# Altium footprint library clusterhead.PcbLib: 75 footprints (part 1 of 5)
Each footprint in its own frame and in the unit in brackets; x right, y up, seen from the top. Pads: shape width x height; smd on the part's side, far side on the other; paste and mask are expansions set on the pad; w line width, h text height; cw(c..) or ccw(c..) is an arc to the next point about the centre after c.
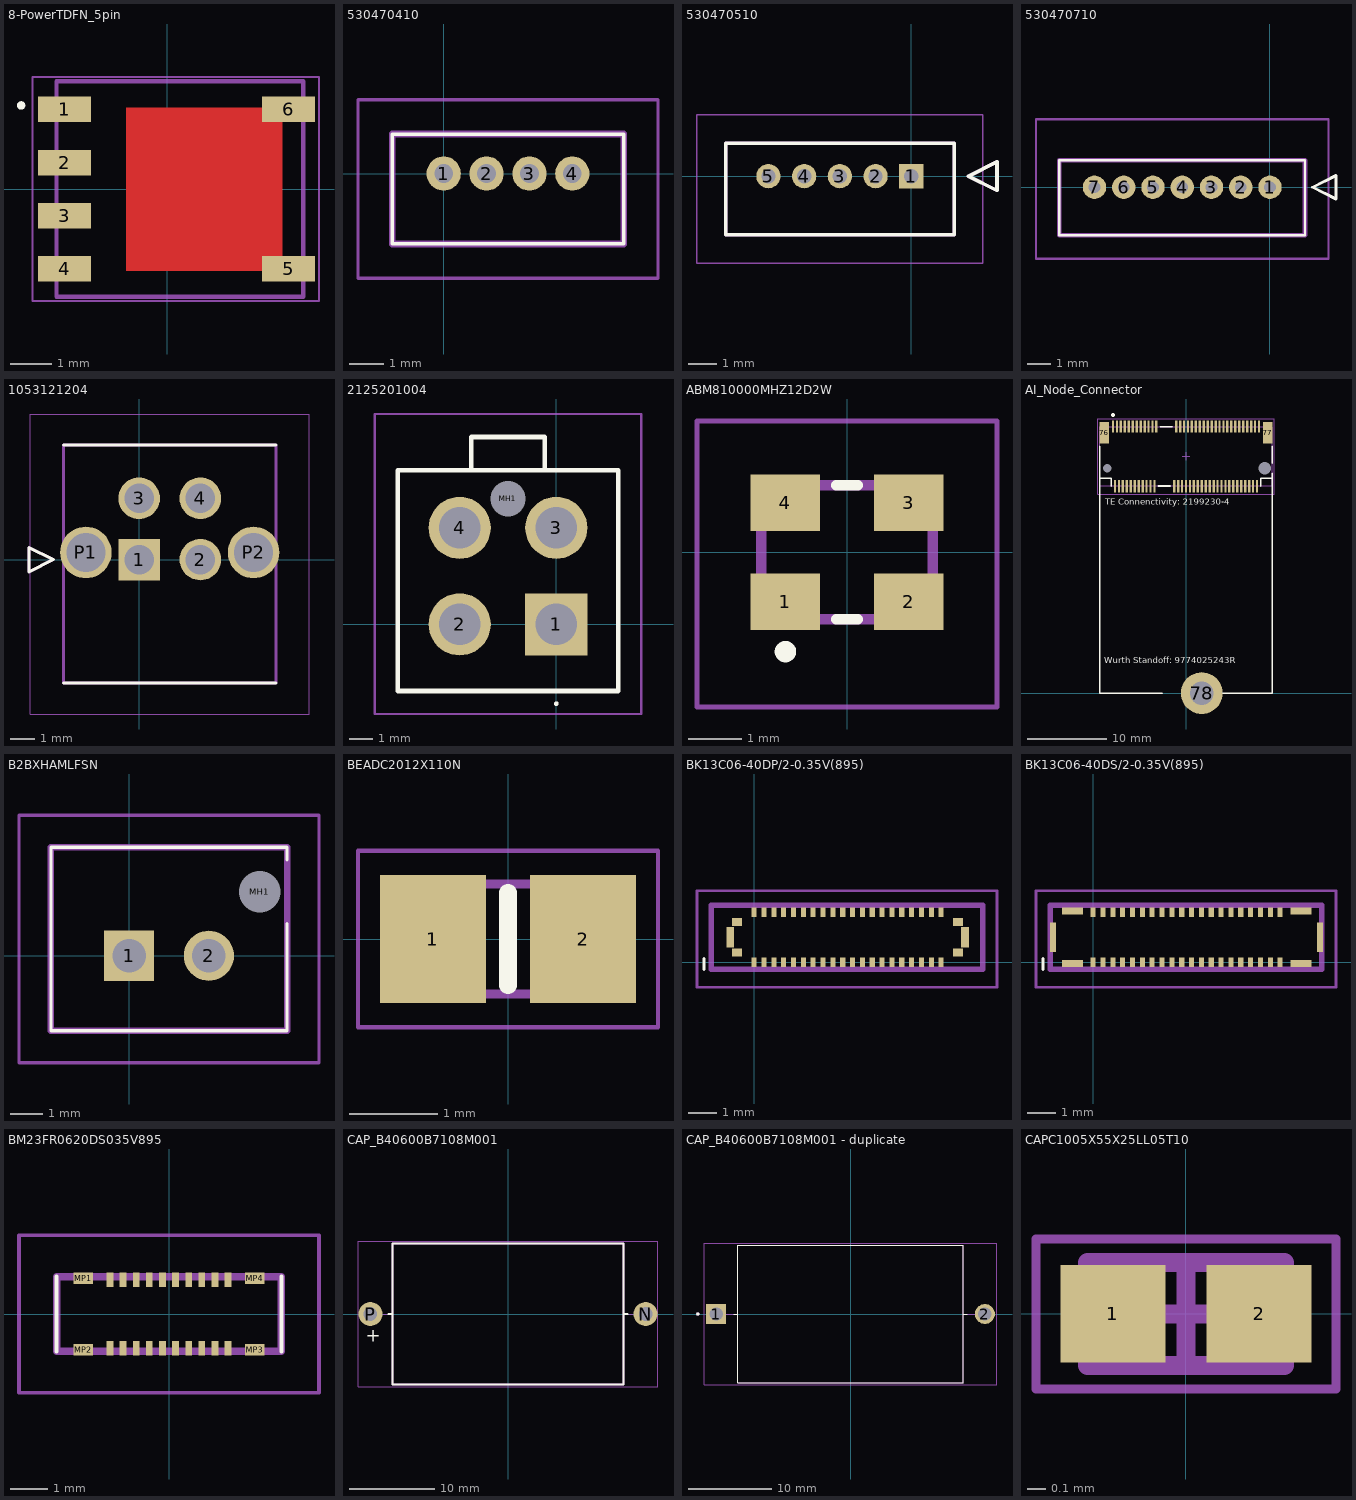
[diagram p0: the footprints below, top view; thin cyan lines are the x and y axes]

## 8-PowerTDFN_5pin [mm] "8-PowerTDFN"
pads (6):
  rect 1.27x0.61 smd: 1(-2.46,1.905) 2(-2.46,0.635) 3(-2.46,-0.635) 4(-2.46,-1.905) 5(2.897,-1.905) 6(2.897,1.905)
Top Layer:
  region: -0.995,1.955 -0.995,-1.955 2.755,-1.955 2.755,1.955
Top Overlay:
  circle w0.1: c-3.5,2 r0.05
Top Paste:
  region: -0.995,1.955 -0.995,-1.955 2.755,-1.955 2.755,1.955
Mechanical 13:
  lines w0.1: -2.653,-2.573 -2.653,2.577 3.247,2.577 3.247,-2.573 -2.653,-2.573
Mechanical 15:
  lines w0.05: -3.228,-2.673 -3.228,2.677 3.622,2.677 3.622,-2.673 -3.228,-2.673
  lines w0.1: -0.503,0.002 0.497,0.002 ; -0.003,-0.498 -0.003,0.502
3D body "IRFH8202TRPBF.STEP": height 1.17, standoff 0, extent -2.737,-2.512 3.338,2.513

## 530470410 [mm]
pads (4):
  round 1 hole 0.55: 1(0,0) 2(1.25,0) 3(2.5,0) 4(3.75,0)
Top Overlay:
  lines w0.1: -1.5,-2.05 5.25,-2.05 5.25,1.15 -1.5,1.15 -1.5,-2.05
Mechanical 13:
  lines w0.2: -1.5,-2.05 5.25,-2.05 5.25,1.15 -1.5,1.15 -1.5,-2.05
Mechanical 15:
  lines w0.1: -2.5,-3.05 6.25,-3.05 6.25,2.15 -2.5,2.15 -2.5,-3.05
3D body "53047-0410.stp": height 4.18, standoff -2.32, extent -1.495,-2.05 5.255,1.15

## 530470510 [mm]
pads (5):
  rect 0.85x0.85 hole 0.5: 1(0,0)
  round 0.85 hole 0.5: 2(-1.25,0) 3(-2.5,0) 4(-3.75,0) 5(-5,0)
Top Overlay:
  lines w0.127: -6.5,-2.05 1.5,-2.05 1.5,1.15 -6.5,1.15 -6.5,-2.05 ; 2,0 3,-0.5 3,0.5 2,0
Mechanical 13:
  lines w0.127: -6.5,-2.05 1.5,-2.05 1.5,1.15 -6.5,1.15 -6.5,-2.05 ; 2,0 3,-0.5 3,0.5 2,0
Mechanical 15:
  lines w0.05: -7.5,-3.05 2.5,-3.05 2.5,2.15 -7.5,2.15 -7.5,-3.05
3D body "530470510.stp": height 4.2, standoff -2.3, extent -6.5,-2.05 1.5,1.15

## 530470710 [mm]
pads (7):
  round 1 hole 0.5: 1(0,0) 2(-1.25,0) 3(-2.5,0) 4(-3.75,0) 5(-5,0) 6(-6.25,0) 7(-7.5,0)
Top Overlay:
  lines w0.1: -9,-2.05 -9,1.15 1.5,1.15 1.5,-2.05 -9,-2.05
  lines w0.127: 1.822,0 2.822,-0.5 2.822,0.5 1.822,0
Mechanical 13:
  lines w0.2: -9,-2.05 -9,1.15 1.5,1.15 1.5,-2.05 -9,-2.05
Mechanical 15:
  lines w0.1: -10,-3.05 -10,2.9 2.5,2.9 2.5,-3.05 -10,-3.05
3D body "53047-0710.stp": height 4.18, standoff -2.32, extent -9,-2.1 1.5,1.1

## 1053121204 [mm]
pads (6):
  rect 1.7x1.7 hole 1.2: 1(0,0)
  round 1.7 hole 1.2: 2(2.5,0) 3(0,2.5) 4(2.5,2.5)
  round 2.1 hole 1.6: P1(-2.17,0.29) P2(4.67,0.29)
Top Overlay:
  lines w0.127: -3.08,-5.03 5.58,-5.03 ; -3.08,4.67 5.58,4.67 ; -4.5,-0.5 -3.5,0 -4.5,0.5 -4.5,-0.5
Mechanical 13:
  lines w0.127: -4.5,-0.5 -3.5,0 -4.5,0.5 -4.5,-0.5 ; -3.08,-5.03 -3.08,4.67 5.58,4.67 5.58,-5.03 -3.08,-5.03
Mechanical 15:
  lines w0.05: -4.439,-6.3 -4.439,5.94 6.939,5.94 6.939,-6.3 -4.439,-6.3
3D body "1053121204.stp": height 10.51, standoff -3.2, extent -3.06,-4.522 5.6,4.318

## 2125201004 [mm]
pads (5):
  rect 2.7x2.7 hole 1.8: 1(0,0)
  round 2.7 hole 1.8: 2(-4.2,0) 3(0,4.2) 4(-4.2,4.2)
  round 0.77 hole 1.54 unplated: MH1(-2.1,5.46)
Top Overlay:
  lines w0.1: 0,-3.5 ccw(c0,-3.45) 0,-3.4 ccw(c0,-3.45) 0,-3.5
  lines w0.2: -3.7,6.7 -3.7,8.15 -0.5,8.15 -0.5,6.7 ; -6.9,-2.9 -6.9,6.7 2.7,6.7 2.7,-2.9 -6.9,-2.9
Mechanical 15:
  lines w0.1: -3.7,6.7 -3.7,8.15 -0.5,8.15 -0.5,6.7 ; -6.9,-2.9 -6.9,6.7 2.7,6.7 2.7,-2.9 -6.9,-2.9
Mechanical 20:
  lines w0.1: -7.9,-3.9 -7.9,9.15 3.7,9.15 3.7,-3.9 -7.9,-3.9
3D body "212520-1004.stp": height 13.75, standoff -3.51, extent -6.806,-2.858 2.794,8.192

## ABM810000MHZ12D2W [mm]
pads (4):
  rect 1.3x1.05 smd: 1(-1.15,-0.925) 2(1.15,-0.925) 3(1.15,0.925) 4(-1.15,0.925)
Top Overlay:
  lines w0.2: -0.2,-1.25 0.2,-1.25 ; -0.2,1.25 0.2,1.25 ; -1.25,-1.854 cw(c-1.15,-1.854) -1.05,-1.854 cw(c-1.15,-1.854) -1.25,-1.854
Mechanical 13:
  lines w0.2: -1.6,-1.25 -1.6,1.25 1.6,1.25 1.6,-1.25 -1.6,-1.25
Mechanical 15:
  lines w0.1: -2.8,-2.887 -2.8,2.45 2.8,2.45 2.8,-2.887 -2.8,-2.887
3D body "ABM8-12.000MHZ-B2-T.stp": height 0.8, standoff 0, extent -1.6,-1.25 1.6,1.25

## AI_Node_Connector [mm]
pads (72):
  rect 0.3x1.55 smd: 1(-9.25,33.775) 2(-9,26.225) 3(-8.75,33.775) 4(-8.5,26.225) 5(-8.25,33.775) 6(-8,26.225) 7(-7.75,33.775) 8(-7.5,26.225) 9(-7.25,33.775) 10(-7,26.225) 11(-6.75,33.775) 12(-6.5,26.225) 13(-6.25,33.775) 14(-6,26.225) 15(-5.75,33.775) 16(-5.5,26.225) 17(-5.25,33.775) 18(-5,26.225) 19(-4.75,33.775) 20(-4.5,26.225) 21(-4.25,33.775) 22(-4,26.225) 23(-3.75,33.775) 32(-1.5,26.225) 33(-1.25,33.775) 34(-1,26.225) 35(-0.75,33.775) 36(-0.5,26.225) 37(-0.25,33.775) 38(0,26.225) 39(0.25,33.775) 40(0.5,26.225) 41(0.75,33.775) 42(1,26.225) 43(1.25,33.775) 44(1.5,26.225) 45(1.75,33.775) 46(2,26.225) 47(2.25,33.775) 48(2.5,26.225) 49(2.75,33.775) 50(3,26.225) 51(3.25,33.775) 52(3.5,26.225) 53(3.75,33.775) 54(4,26.225) 55(4.25,33.775) 56(4.5,26.225) 57(4.75,33.775) 58(5,26.225) 59(5.25,33.775) 60(5.5,26.225) 61(5.75,33.775) 62(6,26.225) 63(6.25,33.775) 64(6.5,26.225) 65(6.75,33.775) 66(7,26.225) 67(7.25,33.775) 68(7.5,26.225) 69(7.75,33.775) 70(8,26.225) 71(8.25,33.775) 72(8.5,26.225) 73(8.75,33.775) 74(9,26.225) 75(9.25,33.775)
  rect 1.2x2.75 smd: 76(-10.35,33) 77(10.35,33)
  round 5.3 hole 3: 78(2,0)
  round 0.5 hole 1.1 unplated mask+0.3: ""(-10,28.5)
  round 1 hole 1.6 unplated mask+0.3: ""(10,28.5)
Top Overlay:
  circle w0.25: c-9.25,35.25 r0.125
  lines w0.2: -10.95,31.275 -10.95,27.25 ; -9.5,26.25 -9.5,27.25 -10.95,27.25 ; -3.5,26.25 -2,26.25 ; -3.25,33.75 -1.75,33.75 ; -3.02,0 -10.95,0 -10.95,0.282 -10.95,27.25 ; 3.076,0 10.95,0 10.95,27.25 ; 9.5,26.25 9.5,27.25 10.95,27.25 ; 10.95,27.852 10.95,27.25 ; 10.95,29.148 10.95,31.275
  text "Wurth Standoff: 9774025243R" at -10.341,3.784 h0.8
  text "TE Connenctivity: 2199230-4" at -10.214,23.863 h0.8
Mechanical 12:
  lines w0.1: -10.95,26.25 10.95,26.25 10.95,33.75 -10.95,33.75 -10.95,26.25
Mechanical 15:
  lines w0.05: -11.2,25.2 11.2,25.2 11.2,34.8 -11.2,34.8 -11.2,25.2
  lines w0.1: -0.5,30 0.5,30 ; 0,29.5 0,30.5
3D body "User Library-M2-A4-socket-cap-screw-din 912.STEP": height 5.5, standoff 0.5, extent 0.1,-1.9 3.9,1.9
3D body "9774025243R (rev1).stp": height 2.5, standoff -1.4, extent -0.175,-2.163 4.175,2.163
3D body "2199230-4--3DModel-STEP-56544.STEP": height 4.2, standoff -0.65, extent -10.95,25.65 10.95,34.35
3D body "Edge_AI_Module_CAD.step": height 4.55, standoff 0.2, extent -11,-0.007 10.988,30

## B2BXHAMLFSN [mm]
pads (3):
  rect 1.575x1.575 hole 1.05: 1(0,0)
  round 1.575 hole 1.05: 2(2.5,0)
  round 0.65 hole 1.3 unplated: MH1(4.1,2)
Top Overlay:
  lines w0.1: -2.45,-2.35 4.95,-2.35 ; -2.45,-2.35 4.95,-2.35 ; -2.45,-2.35 -2.45,3.4 ; -2.45,-2.35 -2.45,3.4 ; -2.45,3.4 4.95,3.4 ; -2.45,3.4 4.95,3.4 ; 4.95,-2.35 4.95,1 4.95,-2.35 ; 4.95,3.4 4.95,3 4.95,3.4
Mechanical 13:
  lines w0.2: -2.45,-2.35 -2.45,3.4 4.95,3.4 4.95,-2.35 -2.45,-2.35
Mechanical 15:
  lines w0.1: -3.45,-3.35 -3.45,4.4 5.95,4.4 5.95,-3.35 -3.45,-3.35
3D body "B2B-XH-AM_LF__SN_.stp": height 6.9, standoff -3.5, extent -2.45,-2.355 4.95,3.395

## BEADC2012X110N [mm]
pads (2):
  rect 1.2x1.45 smd: 1(-0.85,0) 2(0.85,0)
Top Overlay:
  lines w0.2: 0,-0.525 0,0.525
Mechanical 13:
  lines w0.1: -1,-0.625 1,-0.625 1,0.625 -1,0.625 -1,-0.625
Mechanical 15:
  lines w0.05: -1.7,-1 1.7,-1 1.7,1 -1.7,1 -1.7,-1
3D body "BBPY00201209601Y00.stp": height 1.1, standoff 0, extent -1,-0.625 1,0.625

## BK13C06-40DP/2-0.35V(895) [mm]
height 0.55
pads (46):
  rect 0.18x0.325 smd: 1(0,0) 2(0,1.775) 3(0.35,0) 4(0.35,1.775) 5(0.7,0) 6(0.7,1.775) 7(1.05,0) 8(1.05,1.775) 9(1.4,0) 10(1.4,1.775) 11(1.75,0) 12(1.75,1.775) 13(2.1,0) 14(2.1,1.775) 15(2.45,0) 16(2.45,1.775) 17(2.8,0) 18(2.8,1.775) 19(3.15,0) 20(3.15,1.775) 21(3.5,0) 22(3.5,1.775) 23(3.85,0) 24(3.85,1.775) 25(4.2,0) 26(4.2,1.775) 27(4.55,0) 28(4.55,1.775) 29(4.9,0) 30(4.9,1.775) 31(5.25,0) 32(5.25,1.775) 33(5.6,0) 34(5.6,1.775) 35(5.95,0) 36(5.95,1.775) 37(6.3,0) 38(6.3,1.775) 39(6.65,0) 40(6.65,1.775)
  rect 0.28x0.72 smd: SHIELD(-0.85,0.887) SHIELD(7.5,0.887)
  rect 0.35x0.28 smd: SHIELD(-0.605,0.342) SHIELD(-0.605,1.432) SHIELD(7.255,0.342) SHIELD(7.255,1.432)
Top Overlay:
  lines w0.1: -1.778,-0.254 -1.778,0.127
Mechanical 13:
  lines w0.2: -1.524,-0.254 8.128,-0.254 8.128,2.032 -1.524,2.032 -1.524,-0.254
Mechanical 15:
  lines w0.1: -2.032,-0.889 8.636,-0.889 8.636,2.54 -2.032,2.54 -2.032,-0.889
3D body "BK13C06-40DP2-0.35V_3D.stp": height 0, standoff -0.48, extent -0.825,-0.025 7.475,1.775

## BK13C06-40DS/2-0.35V(895) [mm]
height 0.55
pads (46):
  rect 0.18x0.325 smd: 1(0,0) 2(0,1.775) 3(0.35,0) 4(0.35,1.775) 5(0.7,0) 6(0.7,1.775) 7(1.05,0) 8(1.05,1.775) 9(1.4,0) 10(1.4,1.775) 11(1.75,0) 12(1.75,1.775) 13(2.1,0) 14(2.1,1.775) 15(2.45,0) 16(2.45,1.775) 17(2.8,0) 18(2.8,1.775) 19(3.15,0) 20(3.15,1.775) 21(3.5,0) 22(3.5,1.775) 23(3.85,0) 24(3.85,1.775) 25(4.2,0) 26(4.2,1.775) 27(4.55,0) 28(4.55,1.775) 29(4.9,0) 30(4.9,1.775) 31(5.25,0) 32(5.25,1.775) 33(5.6,0) 34(5.6,1.775) 35(5.95,0) 36(5.95,1.775) 37(6.3,0) 38(6.3,1.775) 39(6.65,0) 40(6.65,1.775)
  rect 0.215x1.04 smd: SHIELD(-1.422,0.887) SHIELD(8.072,0.887)
  rect 0.75x0.235 smd: SHIELD(-0.735,-0.045) SHIELD(-0.735,1.82) SHIELD(7.385,-0.045) SHIELD(7.385,1.82)
Top Overlay:
  lines w0.1: -1.778,-0.254 -1.778,0.127
Mechanical 13:
  lines w0.2: -1.524,-0.254 -1.524,2.032 8.128,2.032 8.128,-0.254 -1.524,-0.254
Mechanical 15:
  lines w0.1: -2.032,-0.889 -2.032,2.54 8.636,2.54 8.636,-0.889 -2.032,-0.889
3D body "BK13C06-40DS2-0.35V_3D.stp": height 0.54, standoff -0.01, extent -1.323,-0.122 7.927,1.778

## BM23FR0620DS035V895 [mm]
pads (24):
  rect 0.18x0.38 smd: 1(-1.575,-0.91) 2(-1.575,0.91) 3(-1.225,-0.91) 4(-1.225,0.91) 5(-0.875,-0.91) 6(-0.875,0.91) 7(-0.525,-0.91) 8(-0.525,0.91) 9(-0.175,-0.91) 10(-0.175,0.91) 11(0.175,-0.91) 12(0.175,0.91) 13(0.525,-0.91) 14(0.525,0.91) 15(0.875,-0.91) 16(0.875,0.91) 17(1.225,-0.91) 18(1.225,0.91) 19(1.575,-0.91) 20(1.575,0.91)
  rect 0.52x0.3 smd: MP1(-2.28,0.95) MP2(-2.28,-0.95) MP3(2.28,-0.95) MP4(2.28,0.95)
Top Overlay:
  lines w0.1: -3,-1 -3,1 ; 3,-1 3,1
Mechanical 13:
  lines w0.2: -3,-0.99 3,-0.99 3,0.99 -3,0.99 -3,-0.99
Mechanical 15:
  lines w0.1: -4,-2.1 4,-2.1 4,2.1 -4,2.1 -4,-2.1
3D body "BM23FR0.6-20DS-0.35V_895_.stp": height 0.7, standoff 0, extent -3,-1.082 3,1.082

## CAP_B40600B7108M001 [mm]
height 16.5
pads (2):
  round 2.8 hole 1.6: N(16.1,0) P(-16.1,0)
Top Overlay:
  lines w0.25: -14,0 -13.5,0 ; 14,0 13.5,0 ; -13.5,0 -13.5,8.25 13.5,8.25 13.5,0 ; -13.5,0 -13.5,-8.25 13.5,-8.25 13.5,0
  text "+" at -16.616,-3.226 h1.52
Mechanical 13:
  lines w0.127: -16.1,0 -13.5,0 ; 13.5,0 16.1,0
  lines w0.25: -13.5,-8.25 -13.5,0 -13.5,8.25 13.5,8.25 13.5,0 13.5,-8.25 -13.5,-8.25
Mechanical 15:
  lines w0.05: -17.55,-8.5 -17.55,8.5 17.55,8.5 17.55,-8.5 -17.55,-8.5
3D body "B40600B7108M001_cut.STEP": height 16.48, standoff -3, extent -16.7,-8.25 16.7,8.25

## CAP_B40600B7108M001 - duplicate [mm]
height 16.5
pads (2):
  rect 2.4x2.4 / inner round 2.4 / far side rect 2.4x2.4 hole 1.6: 1(-16.1,0)
  round 2.4 hole 1.6: 2(16.1,0)
Top Overlay:
  circle w0.2: c-18.3,0 r0.1
  lines w0.127: -14,0 -13.5,0 ; 14,0 13.5,0 ; -13.5,0 -13.5,8.25 13.5,8.25 13.5,0 ; -13.5,0 -13.5,-8.25 13.5,-8.25 13.5,0
Mechanical 13:
  circle w0.2: c-18.3,0 r0.1
  lines w0.127: -16.1,0 -13.5,0 ; 16.1,0 13.5,0 ; -13.5,0 -13.5,8.25 13.5,8.25 13.5,0 ; -13.5,0 -13.5,-8.25 13.5,-8.25 13.5,0
Mechanical 15:
  lines w0.05: -17.55,-8.5 -17.55,8.5 17.55,8.5 17.55,-8.5 -17.55,-8.5
3D body "step_temp.STEP": height 16.5, standoff -29.71, extent -16.7,-8.25 16.7,8.25

## CAPC1005X55X25LL05T10 [mm] "Chip Capacitor, 2-Leads, Body 1.00x0.50mm, IPC High Density"
height 0.55
pads (2):
  rect 0.56x0.52 smd: 1(-0.39,0) 2(0.39,0)
Mechanical 13:
  lines w0.1: -0.525,-0.275 0.525,-0.275 0.525,0.275 -0.525,0.275 -0.525,-0.275
Mechanical 15:
  lines w0.05: -0.8,-0.4 0.8,-0.4 0.8,0.4 -0.8,0.4 -0.8,-0.4
  lines w0.1: -0.275,0 0.275,0 ; 0,-0.275 0,0.275
3D body: height 0.55, standoff 0, extent 0.275,-0.275 0.525,0.275
3D body: height 0.55, standoff 0, extent -0.525,-0.275 -0.275,0.275
3D body: height 0.55, standoff 0, extent -0.275,-0.275 0.275,0.275